# Altium footprint library LimeMicroAltiumLib.PcbLib: 876 footprints (part 52 of 57)
Each footprint in its own frame and in the unit in brackets; x right, y up, seen from the top. Pads: shape width x height; smd on the part's side, far side on the other; paste and mask are expansions set on the pad; w line width, h text height; cw(c..) or ccw(c..) is an arc to the next point about the centre after c.
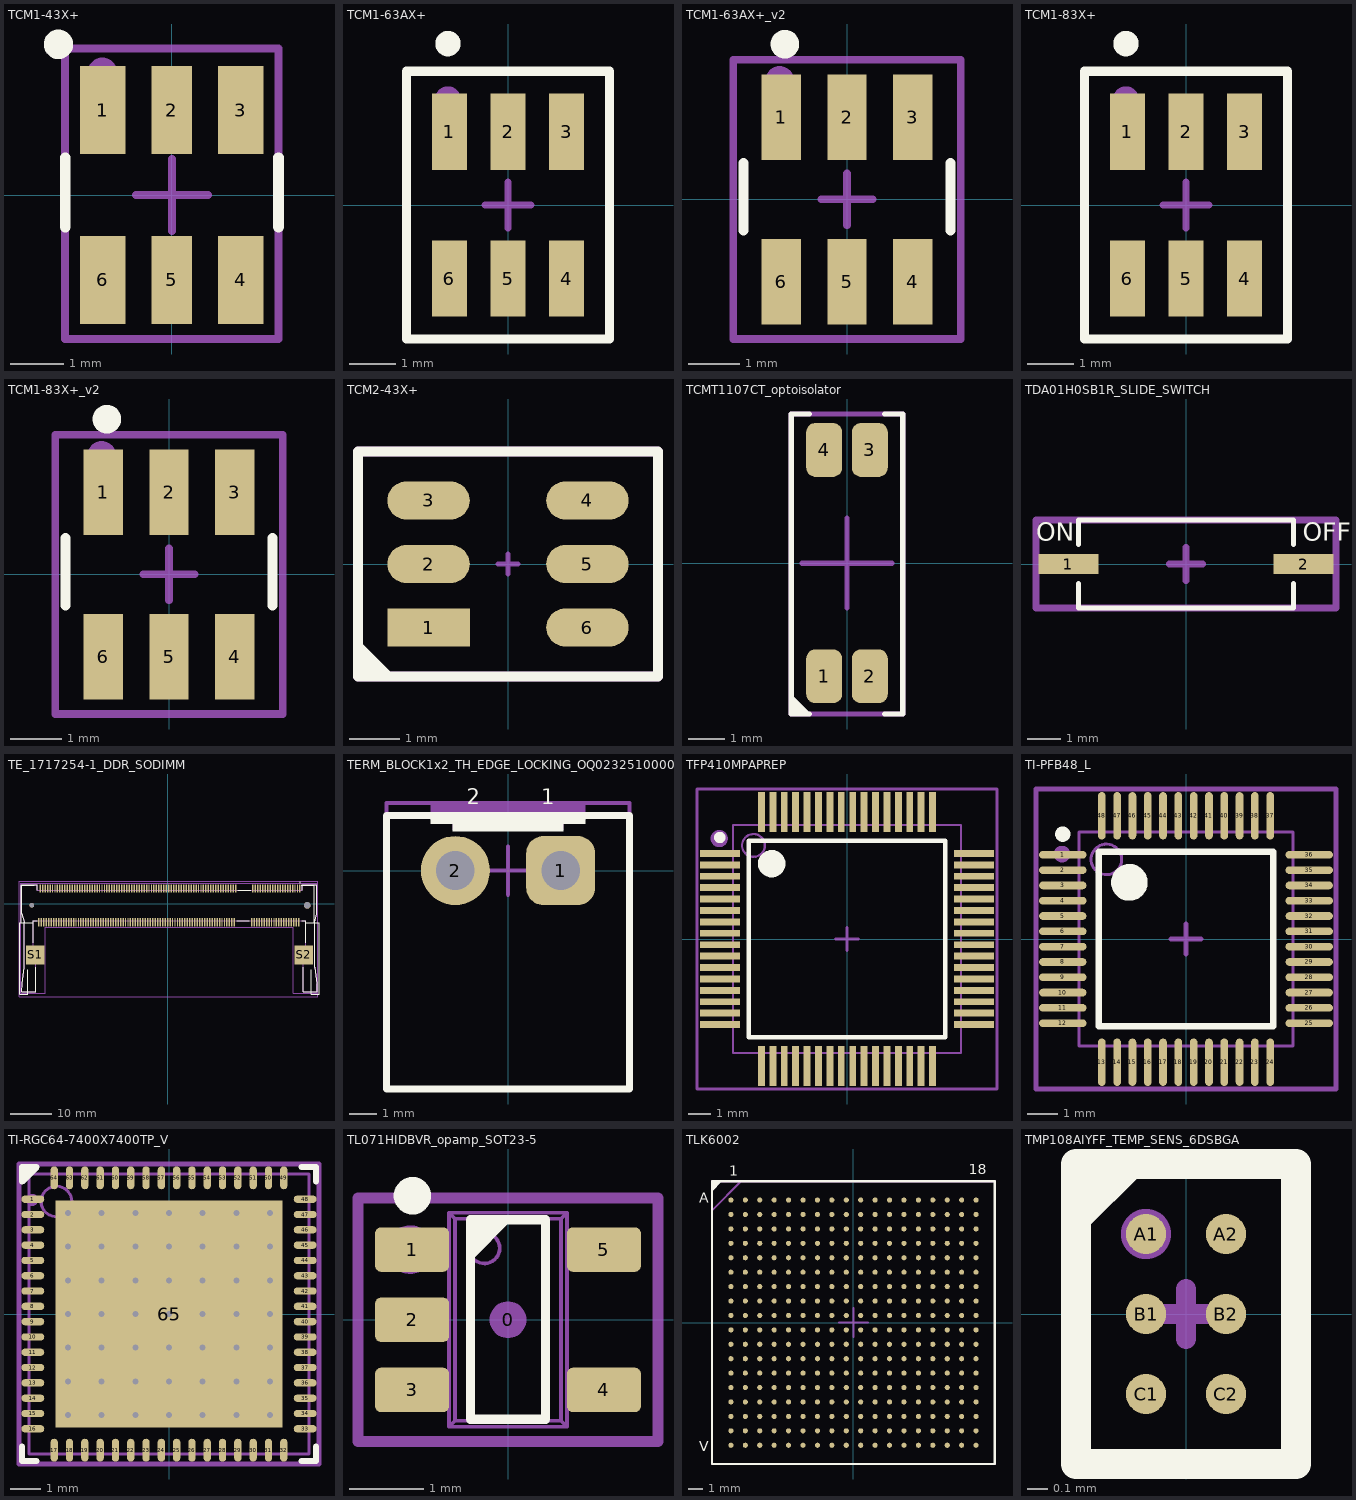
[diagram p51: the footprints below, top view; thin cyan lines are the x and y axes]

## TCM1-43X+ [mm] "Balun"
pads (6):
  rect 0.85x1.65 smd: 1(-1.295,1.59) 3(1.295,1.59) 4(1.295,-1.59) 6(-1.295,-1.59)
  rect 0.76x1.65 smd: 2(0,1.59) 5(0,-1.59)
Top Overlay:
  circle w0.35: c-2.125,2.825 r0.1
  lines w0.2: -2,-0.6 -2,0.7 ; 2,-0.6 2,0.7
Mechanical 15:
  circle w0.35: c-1.3,2.3 r0.1
  lines w0.15: -0.675,0 0,0 ; 0,-0.675 0,0 ; 0,0.675 0,0 ; 0.675,0 0,0 ; -2,-2.7 -2,2.75 2,2.75 2,-2.7 -2,-2.7
  text ".designator" at 0,0 h0.55
3D body: height 1, standoff 0, extent -1.275,-1.612 1.275,1.613
3D body "User Library-LQW2BH.step": height 2.8, standoff 1, extent -0.75,-1 0.75,1

## TCM1-63AX+ [mm] "Balun"
pads (6):
  rect 0.76x1.65 smd: 1(-1.27,1.59) 2(0,1.59) 3(1.27,1.59) 4(1.27,-1.59) 5(0,-1.59) 6(-1.27,-1.59)
Top Overlay:
  circle w0.35: c-1.3,3.5 r0.1
  lines w0.2: -2.2,-2.9 -2.2,2.9 2.2,2.9 2.2,-2.9 -2.2,-2.9
Mechanical 15:
  circle w0.35: c-1.3,2.3 r0.1
  lines w0.15: -0.5,0 0,0 ; 0,-0.5 0,0 ; 0,0.5 0,0 ; 0.5,0 0,0 ; -2.2,-2.9 -2.2,2.9 2.2,2.9 2.2,-2.9 -2.2,-2.9
  text ".designator" at 0,0 h0.55
3D body: height 1, standoff 0, extent -1.275,-1.612 1.275,1.613
3D body "User Library-LQW2BH.step": height 2.8, standoff 1, extent -0.75,-1 0.75,1

## TCM1-63AX+_v2 [mm] "Balun"
pads (6):
  rect 0.76x1.65 smd: 1(-1.27,1.59) 2(0,1.59) 3(1.27,1.59) 4(1.27,-1.59) 5(0,-1.59) 6(-1.27,-1.59)
Top Overlay:
  circle w0.35: c-1.2,3 r0.1
  lines w0.2: -2,-0.6 -2,0.7 ; 2,-0.6 2,0.7
Mechanical 15:
  circle w0.35: c-1.3,2.3 r0.1
  lines w0.15: -0.5,0 0,0 ; 0,-0.5 0,0 ; 0,0.5 0,0 ; 0.5,0 0,0 ; -2.2,-2.7 -2.2,2.7 2.2,2.7 2.2,-2.7 -2.2,-2.7
  text ".designator" at 0,0 h0.55
3D body: height 1, standoff 0, extent -1.275,-1.612 1.275,1.613
3D body "User Library-LQW2BH.step": height 2.8, standoff 1, extent -0.75,-1 0.75,1

## TCM1-83X+ [mm] "Balun"
pads (6):
  rect 0.76x1.65 smd: 1(-1.27,1.59) 2(0,1.59) 3(1.27,1.59) 4(1.27,-1.59) 5(0,-1.59) 6(-1.27,-1.59)
Top Overlay:
  circle w0.35: c-1.3,3.5 r0.1
  lines w0.2: -2.2,-2.9 2.2,-2.9 2.2,2.9 -2.2,2.9 -2.2,-2.9
Mechanical 15:
  circle w0.35: c-1.3,2.3 r0.1
  lines w0.15: -0.5,0 0,0 ; 0,-0.5 0,0 ; 0,0.5 0,0 ; 0.5,0 0,0 ; -2.2,-2.9 2.2,-2.9 2.2,2.9 -2.2,2.9 -2.2,-2.9
  text ".designator" at 0,0 h0.55
3D body "User Library-LQW2BH.step": height 2.8, standoff 1, extent -0.75,-1 0.75,1
3D body: height 1, standoff 0, extent -1.275,-1.612 1.275,1.613

## TCM1-83X+_v2 [mm] "Balun"
pads (6):
  rect 0.76x1.65 smd: 1(-1.27,1.59) 2(0,1.59) 3(1.27,1.59) 4(1.27,-1.59) 5(0,-1.59) 6(-1.27,-1.59)
Top Overlay:
  circle w0.35: c-1.2,3 r0.1
  lines w0.2: -2,-0.6 -2,0.7 ; 2,-0.6 2,0.7
Mechanical 15:
  circle w0.35: c-1.3,2.3 r0.1
  lines w0.15: -0.5,0 0,0 ; 0,-0.5 0,0 ; 0,0.5 0,0 ; 0.5,0 0,0 ; -2.2,-2.7 2.2,-2.7 2.2,2.7 -2.2,2.7 -2.2,-2.7
  text ".designator" at 0,0 h0.55
3D body "User Library-LQW2BH.step": height 2.8, standoff 1, extent -0.75,-1 0.75,1
3D body: height 1, standoff 0, extent -1.275,-1.612 1.275,1.613

## TCM2-43X+ [mm]
pads (6):
  rect 1.65x0.76 smd: 1(-1.59,-1.27)
  oval 1.65x0.76 smd: 2(-1.59,0) 3(-1.59,1.27) 4(1.59,1.27) 5(1.59,0) 6(1.59,-1.27)
Top Overlay:
  region: -3,-1.5 -3,-2.25 -2.25,-2.25
  lines w0.2: -3,-2.25 3,-2.25 3,2.25 -3,2.25 -3,-2.25
Mechanical 15:
  circle w0.2: c-1.75,-1.25 r0.071
  lines w0.1: -0.2,0 0.2,0 ; 0,-0.2 0,0.2
  lines w0.2: -3,-2.25 -3,2.25 3,2.25 3,-2.25 -3,-2.25
  text ".Designator" at 0,0 h0.55
3D body: height 4.06, standoff 0, extent -1.905,-1.905 1.905,2.032

## TCMT1107CT_optoisolator [mm]
pads (4):
  rrect50% 1x1.5 smd mask+0.05: 1(-0.635,-3.15) 2(0.635,-3.15) 3(0.635,3.15) 4(-0.635,3.15)
Top Overlay:
  region: -1,-4.2 -1.55,-3.65 -1.55,-4.2
  lines w0.15: -1.05,-4.2 -1.55,-4.2 -1.55,4.15 -1.05,4.15 ; 1.05,-4.2 1.55,-4.2 1.55,4.15 1.05,4.15
Mechanical 15:
  lines w0.15: -1.55,-4.2 -1.55,4.15 1.55,4.15 1.55,-4.2 -1.5,-4.2 ; -1.25,0 0,0 ; 0,-1.25 0,0 ; 0,1.25 0,0 ; 1.25,0 0,0
  text "4" at -1.1,2.7 h0.55
  text "1" at -0.9,-3.9 h0.55
  text ".Designator" at 0,0 h0.55
3D body "User Library-ACPL-217-56DE.step": height 2.01, standoff -0.12, extent -1.3,-3.55 1.3,3.45

## TDA01H0SB1R_SLIDE_SWITCH [mm]
pads (2):
  rect 1.8x0.6 smd mask+0.05: 1(-3.531,0) 2(3.531,0)
Top Overlay:
  lines w0.152: -3.226,-0.587 -3.226,-1.321 3.226,-1.321 3.226,-0.587 ; -3.226,0.587 -3.226,1.321 3.226,1.321 3.226,0.587
  text "ON" at -4.5,0.7 h0.55
  text "OFF" at 3.5,0.7 h0.55
Mechanical 15:
  lines w0.2: -0.5,0 0,0 ; 0,-0.5 0,0 ; 0,0.5 0,0 ; 0.5,0 0,0 ; -4.5,-1.321 -4.5,1.321 4.5,1.321 4.5,-1.321 -4.5,-1.321
  text ".Designator" at 0,0 h0.55
  text "ON" at -3.9,-0.3 h0.55
3D body "TDA01H0SB1R.stp": height 2.3, standoff 0, extent -4.06,-1.2 4.06,1.2

## TE_1717254-1_DDR_SODIMM [mm] "(DDR2 SO-DIMM)"
pads (204):
  rect 0.35x2 smd mask+0.05: 1(32.025,3.75) 2(31.725,-4.45) 3(31.425,3.75) 4(31.125,-4.45) 5(30.825,3.75) 6(30.525,-4.45) 7(30.225,3.75) 8(29.925,-4.45) 9(29.625,3.75) 10(29.325,-4.45) 11(29.025,3.75) 12(28.725,-4.45) 13(28.425,3.75) 14(28.125,-4.45) 15(27.825,3.75) 16(27.525,-4.45) 17(27.225,3.75) 18(26.925,-4.45) 19(26.625,3.75) 20(26.325,-4.45) 21(26.025,3.75) 22(25.725,-4.45) 23(25.425,3.75) 24(25.125,-4.45) 25(24.825,3.75) 26(24.525,-4.45) 27(24.225,3.75) 28(23.925,-4.45) 29(23.625,3.75) 30(23.325,-4.45) 31(23.025,3.75) 32(22.725,-4.45) 33(22.425,3.75) 34(22.125,-4.45) 35(21.825,3.75) 36(21.525,-4.45) 37(21.225,3.75) 38(20.925,-4.45) 39(20.625,3.75) 40(20.325,-4.45) 41(16.425,3.75) 42(16.125,-4.45) 43(15.825,3.75) 44(15.525,-4.45) 45(15.225,3.75) 46(14.925,-4.45) 47(14.625,3.75) 48(14.325,-4.45) 49(14.025,3.75) 50(13.725,-4.45) 51(13.425,3.75) 52(13.125,-4.45) 53(12.825,3.75) 54(12.525,-4.45) 55(12.225,3.75) 56(11.925,-4.45) 57(11.625,3.75) 58(11.325,-4.45) 59(11.025,3.75) 60(10.725,-4.45) 61(10.425,3.75) 62(10.125,-4.45) 63(9.825,3.75) 64(9.525,-4.45) 65(9.225,3.75) 66(8.925,-4.45) 67(8.625,3.75) 68(8.325,-4.45) 69(8.025,3.75) 70(7.725,-4.45) 71(7.425,3.75) 72(7.125,-4.45) 73(6.825,3.75) 74(6.525,-4.45) 75(6.225,3.75) 76(5.925,-4.45) 77(5.625,3.75) 78(5.325,-4.45) 79(5.025,3.75) 80(4.725,-4.45) 81(4.425,3.75) 82(4.125,-4.45) 83(3.825,3.75) 84(3.525,-4.45) 85(3.225,3.75) 86(2.925,-4.45) 87(2.625,3.75) 88(2.325,-4.45) 89(2.025,3.75) 90(1.725,-4.45) 91(1.425,3.75) 92(1.125,-4.45) 93(0.825,3.75) 94(0.525,-4.45) 95(0.225,3.75) 96(-0.075,-4.45) 97(-0.375,3.75) 98(-0.675,-4.45) 99(-0.975,3.75) 100(-1.275,-4.45) 101(-1.575,3.75) 102(-1.875,-4.45) 103(-2.175,3.75) 104(-2.475,-4.45) 105(-2.775,3.75) 106(-3.075,-4.45) 107(-3.375,3.75) 108(-3.675,-4.45) 109(-3.975,3.75) 110(-4.275,-4.45) 111(-4.575,3.75) 112(-4.875,-4.45) 113(-5.175,3.75) 114(-5.475,-4.45) 115(-5.775,3.75) 116(-6.075,-4.45) 117(-6.375,3.75) 118(-6.675,-4.45) 119(-6.975,3.75) 120(-7.275,-4.45) 121(-7.575,3.75) 122(-7.875,-4.45) 123(-8.175,3.75) 124(-8.475,-4.45) 125(-8.775,3.75) 126(-9.075,-4.45) 127(-9.375,3.75) 128(-9.675,-4.45) 129(-9.975,3.75) 130(-10.275,-4.45) 131(-10.575,3.75) 132(-10.875,-4.45) 133(-11.175,3.75) 134(-11.475,-4.45) 135(-11.775,3.75) 136(-12.075,-4.45) 137(-12.375,3.75) 138(-12.675,-4.45) 139(-12.975,3.75) 140(-13.275,-4.45) 141(-13.575,3.75) 142(-13.875,-4.45) 143(-14.175,3.75) 144(-14.475,-4.45) 145(-14.775,3.75) 146(-15.075,-4.45) 147(-15.375,3.75) 148(-15.675,-4.45) 149(-15.975,3.75) 150(-16.275,-4.45) 151(-16.575,3.75) 152(-16.875,-4.45) 153(-17.175,3.75) 154(-17.475,-4.45) 155(-17.775,3.75) 156(-18.075,-4.45) 157(-18.375,3.75) 158(-18.675,-4.45) 159(-18.975,3.75) 160(-19.275,-4.45) 161(-19.575,3.75) 162(-19.875,-4.45) 163(-20.175,3.75) 164(-20.475,-4.45) 165(-20.775,3.75) 166(-21.075,-4.45) 167(-21.375,3.75) 168(-21.675,-4.45) 169(-21.975,3.75) 170(-22.275,-4.45) 171(-22.575,3.75) 172(-22.875,-4.45) 173(-23.175,3.75) 174(-23.475,-4.45) 175(-23.775,3.75) 176(-24.075,-4.45) 177(-24.375,3.75) 178(-24.675,-4.45) 179(-24.975,3.75) 180(-25.275,-4.45) 181(-25.575,3.75) 182(-25.875,-4.45) 183(-26.175,3.75) 184(-26.475,-4.45) 185(-26.775,3.75) 186(-27.075,-4.45) 187(-27.375,3.75) 188(-27.675,-4.45) 189(-27.975,3.75) 190(-28.275,-4.45) 191(-28.575,3.75) 192(-28.875,-4.45) 193(-29.175,3.75) 194(-29.475,-4.45) 195(-29.775,3.75) 196(-30.075,-4.45) 197(-30.375,3.75) 198(-30.675,-4.45) 199(-30.975,3.75) 200(-31.275,-4.45)
  round 1.1 hole 1.1 unplated: None(-33.025,-0.35)
  round 1.6 hole 1.6 unplated: None(33.775,-0.35)
  rect 4.5x4.6 smd: S1(-32.175,-12.35) S2(32.925,-12.35)
Top Overlay:
  circle w0.15: c32.025,5.2 r0.1
  lines w0.15: -35.512,-4.505 -35.891,-4.505 -35.891,-21.923 -34.031,-21.923 -34.031,-15.999 ; -35.375,-21.35 -32.025,-21.35 -32.025,-15.35 ; -35.375,-21.3 -35.325,-19.35 -34.825,-15.35 -34.825,-4.4 -35.375,-2.35 -35.375,4.65 -31.625,4.65 -31.625,3.35 ; -32.625,-9.35 -32.625,-4.05 -31.725,-4.05 ; -32.625,-4.505 -35.5,-4.505 -35.5,4.5 -32.385,4.5 ; 16.675,-4.05 19.675,-4.05 ; 16.975,3.35 20.075,3.35 ; 32.385,4.499 35.5,4.499 35.5,-4.505 ; 32.475,-4.05 33.375,-4.05 33.375,-9.35 ; 32.575,3.35 32.575,4.65 36.125,4.65 36.125,-2.35 35.575,-4.4 35.575,-15.35 36.075,-19.35 36.125,-21.3 ; 32.775,-15.35 32.775,-21.35 36.125,-21.35 ; 33.375,-4.505 36.25,-4.505 ; 34.781,-15.999 34.781,-21.923 36.641,-21.923 36.641,-4.505 36.262,-4.505
Mechanical 13:
  lines w0.05: -35.625,-21.6 -29.675,-21.6 -29.675,-5.7 30.425,-5.7 30.425,-21.6 36.375,-21.6 36.375,5 -35.625,5 -35.625,-21.6
  lines w0.127: -35.375,-21.35 -32.025,-21.35 -32.025,-14.05 -31.275,-14.05 -31.275,-10.45 -32.625,-10.45 -32.625,-4.05 33.375,-4.05 33.375,-10.45 32.025,-10.45 32.025,-14.05 32.775,-14.05 32.775,-21.35 36.065,-21.35 ; -35.375,-21.3 -35.325,-19.35 -34.825,-15.35 -34.825,-4.4 -35.375,-2.35 -35.375,4.65 -31.625,4.65 -31.625,3.35 32.575,3.35 32.575,4.65 36.125,4.65 36.125,-2.35 35.575,-4.4 35.575,-15.35 36.075,-19.35 36.075,-21.34
Mechanical 15:
  lines w0.3: -36.1,-22.5 36.3,-22.5 36.3,5.5 -36.1,5.5 -36.1,-22.5
  text "199" at -33,3.5 h0.55
  text "200" at -33,-4.5 h0.55
  text "42" at 16,-4.5 h0.55
  text "41" at 16,3.5 h0.55
  text "39" at 19.5,3.5 h0.55
  text "40" at 19,-4.5 h0.55
  text "2" at 31.5,-4.5 h0.55
  text "1" at 31.5,4 h0.55
  text ".Designator" at 0,0 h0.55
3D body "c-1473005-4-j1-3d.stp": height 5.27, standoff -0.63, extent -35.375,-21.425 36.125,4.625
3D body "User Library-compute_module.step": height 4.1, standoff 2.6, extent -33.55,-30.5 34.05,-0.5

## TERM_BLOCK1x2_TH_EDGE_LOCKING_OQ0232510000G [mm]
pads (2):
  rrect50% 2.5x2.5 hole 1.4: 1(1.905,0)
  round 2.5 hole 1.4: 2(-1.905,0)
Top Overlay:
  region: 2,1.425 2,1.775 -2,1.775 -2,1.425
  region: -2.8,2.05 -2.8,1.7 2.8,1.7 2.8,2.05
  lines w0.254: -4.4,-7.9 4.4,-7.9 4.4,2 -4.4,2 -4.4,-7.9
  text "1" at 1.2,2.4 h0.55
  text "2" at -1.5,2.4 h0.55
Mechanical 15:
  region: -2,1.5 -2,1.85 2,1.85 2,1.5
  region: -2.8,2.45 -2.8,1.85 2.8,1.85 2.8,2.45
  lines w0.15: -0.875,0 0,0 ; 0,-0.875 0,0 ; 0,0.875 0,0 ; 0.875,0 0,0 ; -4.4,-7.9 -4.4,2.45 4.4,2.45 4.4,-7.9 -4.4,-7.9
  text ".Designator" at 0,0 h0.55
  text "KEY" at -0.7,0.9 h0.55
  text "1" at 1.125,-1 h0.55
3D body "OQ0232510000G.STEP": height 7.2, standoff -3.5, extent -4.405,-8 4.405,1.2

## TFP410MPAPREP [mm] "TSQFP, 64-Leads, Body 10,00x10,00mm, Pitch 0,50mm, IPC Medium Density"
height 1.2
pads (64):
  rect 1.75x0.3 smd mask+0.05: 1(-5.575,3.75) 2(-5.575,3.25) 3(-5.575,2.75) 4(-5.575,2.25) 5(-5.575,1.75) 6(-5.575,1.25) 7(-5.575,0.75) 8(-5.575,0.25) 9(-5.575,-0.25) 10(-5.575,-0.75) 11(-5.575,-1.25) 12(-5.575,-1.75) 13(-5.575,-2.25) 14(-5.575,-2.75) 15(-5.575,-3.25) 16(-5.575,-3.75) 33(5.575,-3.75) 34(5.575,-3.25) 35(5.575,-2.75) 36(5.575,-2.25) 37(5.575,-1.75) 38(5.575,-1.25) 39(5.575,-0.75) 40(5.575,-0.25) 41(5.575,0.25) 42(5.575,0.75) 43(5.575,1.25) 44(5.575,1.75) 45(5.575,2.25) 46(5.575,2.75) 47(5.575,3.25) 48(5.575,3.75)
  rect 0.3x1.75 smd mask+0.05: 17(-3.75,-5.575) 18(-3.25,-5.575) 19(-2.75,-5.575) 20(-2.25,-5.575) 21(-1.75,-5.575) 22(-1.25,-5.575) 23(-0.75,-5.575) 24(-0.25,-5.575) 25(0.25,-5.575) 26(0.75,-5.575) 27(1.25,-5.575) 28(1.75,-5.575) 29(2.25,-5.575) 30(2.75,-5.575) 31(3.25,-5.575) 32(3.75,-5.575) 49(3.75,5.575) 50(3.25,5.575) 51(2.75,5.575) 52(2.25,5.575) 53(1.75,5.575) 54(1.25,5.575) 55(0.75,5.575) 56(0.25,5.575) 57(-0.25,5.575) 58(-0.75,5.575) 59(-1.25,5.575) 60(-1.75,5.575) 61(-2.25,5.575) 62(-2.75,5.575) 63(-3.25,5.575) 64(-3.75,5.575)
Top Overlay:
  circle w0.25: c-5.575,4.45 r0.125
  circle w0.6: c-3.3,3.3 r0.3
  lines w0.2: -4.3,-4.3 -4.3,4.3 4.3,4.3 4.3,-4.3 -4.3,-4.3
Mechanical 13:
  circle w0.1: c-4.1,4.1 r0.5
  lines w0.1: -5,-5 -5,5 5,5 5,-5 -5,-5
Mechanical 15:
  circle w0.35: c-5.6,4.4 r0.2
  lines w0.15: -0.5,0 0.5,0 ; 0,-0.5 0,0.5 ; -6.575,-6.575 -6.575,6.575 6.575,6.575 6.575,-6.575 -6.575,-6.575
  text ".Designator" at 0,0 h0.55
3D body "User Library-LQFP-64-1.step": height 1.45, standoff -0.05, extent -5,-6 5,6
3D body "User Library-LQFP-64-1.step": height 1.5, standoff 0, extent -6,-5 6,5

## TI-PFB48_L [mm] "QFP, 48-Leads, Body 7x7mm, Pitch 0.5mm, IPC High Density"
height 1.2
pads (48):
  oval 1.55x0.25 smd mask+0.05: 1(-4.025,2.75) 2(-4.025,2.25) 3(-4.025,1.75) 4(-4.025,1.25) 5(-4.025,0.75) 6(-4.025,0.25) 7(-4.025,-0.25) 8(-4.025,-0.75) 9(-4.025,-1.25) 10(-4.025,-1.75) 11(-4.025,-2.25) 12(-4.025,-2.75) 25(4.025,-2.75) 26(4.025,-2.25) 27(4.025,-1.75) 28(4.025,-1.25) 29(4.025,-0.75) 30(4.025,-0.25) 31(4.025,0.25) 32(4.025,0.75) 33(4.025,1.25) 34(4.025,1.75) 35(4.025,2.25) 36(4.025,2.75)
  oval 0.25x1.55 smd mask+0.05: 13(-2.75,-4.025) 14(-2.25,-4.025) 15(-1.75,-4.025) 16(-1.25,-4.025) 17(-0.75,-4.025) 18(-0.25,-4.025) 19(0.25,-4.025) 20(0.75,-4.025) 21(1.25,-4.025) 22(1.75,-4.025) 23(2.25,-4.025) 24(2.75,-4.025) 37(2.75,4.025) 38(2.25,4.025) 39(1.75,4.025) 40(1.25,4.025) 41(0.75,4.025) 42(0.25,4.025) 43(-0.25,4.025) 44(-0.75,4.025) 45(-1.25,4.025) 46(-1.75,4.025) 47(-2.25,4.025) 48(-2.75,4.025)
Top Overlay:
  circle w0.25: c-4.025,3.425 r0.125
  circle w0.6: c-1.85,1.85 r0.3
  lines w0.2: -2.85,-2.85 -2.85,2.85 2.85,2.85 2.85,-2.85 -2.85,-2.85
Mechanical 13:
  circle w0.1: c-2.6,2.6 r0.5
  lines w0.1: -3.5,-3.5 -3.5,3.5 3.5,3.5 3.5,-3.5 -3.5,-3.5
Mechanical 15:
  circle w0.4: c-4.05,2.775 r0.071
  lines w0.15: -0.5,0 0.5,0 ; 0,-0.5 0,0.5 ; -4.9,-4.9 -4.9,4.9 4.9,4.9 4.9,-4.9 -4.9,-4.9
  text ".Designator" at 0,0 h0.55
3D body "User Library-LQFP48_Grid_0_5.STEP": height 1.6, standoff 0, extent -4.5,-4.5 4.5,4.5

## TI-RGC64-7400X7400TP_V [mm] "QFN, 64-Leads, Body 9x9mm, Pitch 0.5mm, Thermal Pad 7.4x7.4mm, TI Recommended"
height 1
pads (65):
  oval 0.75x0.24 smd mask+0.05: 1(-4.45,3.75) 2(-4.45,3.25) 3(-4.45,2.75) 4(-4.45,2.25) 5(-4.45,1.75) 6(-4.45,1.25) 7(-4.45,0.75) 8(-4.45,0.25) 9(-4.45,-0.25) 10(-4.45,-0.75) 11(-4.45,-1.25) 12(-4.45,-1.75) 13(-4.45,-2.25) 14(-4.45,-2.75) 15(-4.45,-3.25) 16(-4.45,-3.75) 33(4.45,-3.75) 34(4.45,-3.25) 35(4.45,-2.75) 36(4.45,-2.25) 37(4.45,-1.75) 38(4.45,-1.25) 39(4.45,-0.75) 40(4.45,-0.25) 41(4.45,0.25) 42(4.45,0.75) 43(4.45,1.25) 44(4.45,1.75) 45(4.45,2.25) 46(4.45,2.75) 47(4.45,3.25) 48(4.45,3.75)
  oval 0.24x0.75 smd mask+0.05: 17(-3.75,-4.45) 18(-3.25,-4.45) 19(-2.75,-4.45) 20(-2.25,-4.45) 21(-1.75,-4.45) 22(-1.25,-4.45) 23(-0.75,-4.45) 24(-0.25,-4.45) 25(0.25,-4.45) 26(0.75,-4.45) 27(1.25,-4.45) 28(1.75,-4.45) 29(2.25,-4.45) 30(2.75,-4.45) 31(3.25,-4.45) 32(3.75,-4.45) 49(3.75,4.45) 50(3.25,4.45) 51(2.75,4.45) 52(2.25,4.45) 53(1.75,4.45) 54(1.25,4.45) 55(0.75,4.45) 56(0.25,4.45) 57(-0.25,4.45) 58(-0.75,4.45) 59(-1.25,4.45) 60(-1.75,4.45) 61(-2.25,4.45) 62(-2.75,4.45) 63(-3.25,4.45) 64(-3.75,4.45)
  rect 7.4x7.4 smd: 65(0,0)
via 3.3,-3.3 diameter 0.5 hole 0.2
via 2.2,-3.3 diameter 0.5 hole 0.2
via 1.1,-3.3 diameter 0.5 hole 0.2
via 0,-3.3 diameter 0.5 hole 0.2
via -1.1,-3.3 diameter 0.5 hole 0.2
via -2.2,-3.3 diameter 0.5 hole 0.2
via -3.3,-3.3 diameter 0.5 hole 0.2
via 3.3,-2.2 diameter 0.5 hole 0.2
via 2.2,-2.2 diameter 0.5 hole 0.2
via 1.1,-2.2 diameter 0.5 hole 0.2
via 0,-2.2 diameter 0.5 hole 0.2
via -1.1,-2.2 diameter 0.5 hole 0.2
via -2.2,-2.2 diameter 0.5 hole 0.2
via -3.3,-2.2 diameter 0.5 hole 0.2
via 3.3,-1.1 diameter 0.5 hole 0.2
via 2.2,-1.1 diameter 0.5 hole 0.2
via 1.1,-1.1 diameter 0.5 hole 0.2
via 0,-1.1 diameter 0.5 hole 0.2
via -1.1,-1.1 diameter 0.5 hole 0.2
via -2.2,-1.1 diameter 0.5 hole 0.2
via -3.3,-1.1 diameter 0.5 hole 0.2
via 3.3,0 diameter 0.5 hole 0.2
via 2.2,0 diameter 0.5 hole 0.2
via 1.1,0 diameter 0.5 hole 0.2
via 0,0 diameter 0.5 hole 0.2
via -1.1,0 diameter 0.5 hole 0.2
via -2.2,0 diameter 0.5 hole 0.2
via -3.3,0 diameter 0.5 hole 0.2
via 3.3,1.1 diameter 0.5 hole 0.2
via 2.2,1.1 diameter 0.5 hole 0.2
via 1.1,1.1 diameter 0.5 hole 0.2
via 0,1.1 diameter 0.5 hole 0.2
via -1.1,1.1 diameter 0.5 hole 0.2
via -2.2,1.1 diameter 0.5 hole 0.2
via -3.3,1.1 diameter 0.5 hole 0.2
via 3.3,2.2 diameter 0.5 hole 0.2
via 2.2,2.2 diameter 0.5 hole 0.2
via 1.1,2.2 diameter 0.5 hole 0.2
via 0,2.2 diameter 0.5 hole 0.2
via -1.1,2.2 diameter 0.5 hole 0.2
via -2.2,2.2 diameter 0.5 hole 0.2
via -3.3,2.2 diameter 0.5 hole 0.2
via 3.3,3.3 diameter 0.5 hole 0.2
via 2.2,3.3 diameter 0.5 hole 0.2
via 1.1,3.3 diameter 0.5 hole 0.2
via 0,3.3 diameter 0.5 hole 0.2
via -1.1,3.3 diameter 0.5 hole 0.2
via -2.2,3.3 diameter 0.5 hole 0.2
via -3.3,3.3 diameter 0.5 hole 0.2
Top Overlay:
  region: -4.8,4.325 -4.8,4.8 -4.325,4.8
  lines w0.2: -4.8,-4.325 -4.8,-4.8 -4.325,-4.8 ; 4.325,-4.8 4.8,-4.8 4.8,-4.325 ; 4.325,4.8 4.8,4.8 4.8,4.325 ; -4.8,4.325 -4.325,4.8 -4.8,4.8 -4.8,4.325
Mechanical 13:
  circle w0.1: c-3.675,3.675 r0.5
  lines w0.1: -4.575,-4.575 4.575,-4.575 4.575,4.575 -4.575,4.575 -4.575,-4.575
Mechanical 15:
  circle w0.254: c-4.475,3.725 r0.071
  lines w0.15: -0.5,0 0.5,0 ; 0,-0.5 0,0.5 ; -4.9,-4.9 4.9,-4.9 4.9,4.9 -4.9,4.9 -4.9,-4.9
  text ".Designator" at 0,0 h0.55
3D body "User Library-QFN64-2.step": height 0.9, standoff 0, extent -4.52,-4.52 4.52,4.52

## TL071HIDBVR_opamp_SOT23-5 [mm]
height 1.6
pads (6):
  round 0.5 on Mech15: 0(0,0)
  rrect25% 1x0.6 smd: 1(-1.3,0.95) 2(-1.3,0) 3(-1.3,-0.95) 4(1.3,-0.95) 5(1.3,0.95)
Top Overlay:
  circle w0.254: c-1.295,1.68 r0.127
  region: -0.508,1.353 0.053,1.353 -0.508,0.792
  lines w0.127: -0.508,-1.347 -0.508,1.353 0.508,1.353 0.508,-1.347 -0.508,-1.347
Mechanical 13:
  circle w0.05: c-0.32,0.97 r0.208
  lines w0.05: -1.191,-1.15 -1.191,-0.75 ; -1.191,-0.2 -1.191,0.2 ; -1.191,0.75 -1.191,1.15 ; -1.1,-1.15 -1.1,-0.75 ; -1.1,-0.2 -1.1,0.2 ; -1.1,0.75 -1.1,1.15 ; -1.094,-1.15 -1.094,-0.75 ; -1.094,-0.2 -1.094,0.2 ; -1.094,0.75 -1.094,1.15 ; -0.844,-1.15 -0.844,-0.75 ; -0.844,-0.2 -0.844,0.2 ; -0.844,0.75 -0.844,1.15 ; -0.8,-1.15 -1.4,-1.15 -1.4,-0.75 -0.8,-0.75 ; -0.8,-0.2 -1.4,-0.2 -1.4,0.2 -0.8,0.2 ; -0.8,0.75 -1.4,0.75 -1.4,1.15 -0.8,1.15 ; 0.8,-1.15 1.4,-1.15 1.4,-0.75 0.8,-0.75 ; 0.8,0.75 1.4,0.75 1.4,1.15 0.8,1.15 ; 0.844,-1.15 0.844,-0.75 ; 0.844,0.75 0.844,1.15 ; 1.094,-1.15 1.094,-0.75 ; 1.094,0.75 1.094,1.15 ; 1.1,-1.15 1.1,-0.75 ; 1.1,0.75 1.1,1.15 ; 1.191,-1.15 1.191,-0.75 ; 1.191,0.75 1.191,1.15 ; -0.8,-1.45 -0.8,1.45 ; -0.8,-1.45 -0.719,-1.369 ; -0.8,-1.45 0.8,-1.45 ; -0.8,1.45 -0.719,1.369 ; -0.8,1.45 0.8,1.45 ; -0.719,-1.369 0.719,-1.369 ; -0.719,-1.369 -0.719,1.369 ; -0.719,1.369 0.719,1.369 ; 0.719,-1.369 0.8,-1.45 ; 0.719,-1.369 0.719,1.369 ; 0.719,1.369 0.8,1.45 ; 0.8,-1.45 0.8,1.45
Mechanical 15:
  circle w0.35: c-1.325,0.95 r0.152
  lines w0.15: -2.032,-1.651 -2.032,1.651 2.032,1.651 2.032,-1.651 -2.032,-1.651
  text ".Designator" at 0,0 h0.55
3D body "SOT23-5.STEP": height 1.44, standoff -0.01, extent -1.4,-1.45 1.4,1.45

## TLK6002 [mm]
pads (324):
  round 0.356 smd: A1(-8.5,8.5) A2(-7.5,8.5) A3(-6.5,8.5) A4(-5.5,8.5) A5(-4.5,8.5) A6(-3.5,8.5) A7(-2.5,8.5) A8(-1.5,8.5) A9(-0.5,8.5) A10(0.5,8.5) A11(1.5,8.5) A12(2.5,8.5) A13(3.5,8.5) A14(4.5,8.5) A15(5.5,8.5) A16(6.5,8.5) A17(7.5,8.5) A18(8.5,8.5) B1(-8.5,7.5) B2(-7.5,7.5) B3(-6.5,7.5) B4(-5.5,7.5) B5(-4.5,7.5) B6(-3.5,7.5) B7(-2.5,7.5) B8(-1.5,7.5) B9(-0.5,7.5) B10(0.5,7.5) B11(1.5,7.5) B12(2.5,7.5) B13(3.5,7.5) B14(4.5,7.5) B15(5.5,7.5) B16(6.5,7.5) B17(7.5,7.5) B18(8.5,7.5) C1(-8.5,6.5) C2(-7.5,6.5) C3(-6.5,6.5) C4(-5.5,6.5) C5(-4.5,6.5) C6(-3.5,6.5) C7(-2.5,6.5) C8(-1.5,6.5) C9(-0.5,6.5) C10(0.5,6.5) C11(1.5,6.5) C12(2.5,6.5) C13(3.5,6.5) C14(4.5,6.5) C15(5.5,6.5) C16(6.5,6.5) C17(7.5,6.5) C18(8.5,6.5) D1(-8.5,5.5) D2(-7.5,5.5) D3(-6.5,5.5) D4(-5.5,5.5) D5(-4.5,5.5) D6(-3.5,5.5) D7(-2.5,5.5) D8(-1.5,5.5) D9(-0.5,5.5) D10(0.5,5.5) D11(1.5,5.5) D12(2.5,5.5) D13(3.5,5.5) D14(4.5,5.5) D15(5.5,5.5) D16(6.5,5.5) D17(7.5,5.5) D18(8.5,5.5) E1(-8.5,4.5) E2(-7.5,4.5) E3(-6.5,4.5) E4(-5.5,4.5) E5(-4.5,4.5) E6(-3.5,4.5) E7(-2.5,4.5) E8(-1.5,4.5) E9(-0.5,4.5) E10(0.5,4.5) E11(1.5,4.5) E12(2.5,4.5) E13(3.5,4.5) E14(4.5,4.5) E15(5.5,4.5) E16(6.5,4.5) E17(7.5,4.5) E18(8.5,4.5) F1(-8.5,3.5) F2(-7.5,3.5) F3(-6.5,3.5) F4(-5.5,3.5) F5(-4.5,3.5) F6(-3.5,3.5) F7(-2.5,3.5) F8(-1.5,3.5) F9(-0.5,3.5) F10(0.5,3.5) F11(1.5,3.5) F12(2.5,3.5) F13(3.5,3.5) F14(4.5,3.5) F15(5.5,3.5) F16(6.5,3.5) F17(7.5,3.5) F18(8.5,3.5) G1(-8.5,2.5) G2(-7.5,2.5) G3(-6.5,2.5) G4(-5.5,2.5) G5(-4.5,2.5) G6(-3.5,2.5) G7(-2.5,2.5) G8(-1.5,2.5) G9(-0.5,2.5) G10(0.5,2.5) G11(1.5,2.5) G12(2.5,2.5) G13(3.5,2.5) G14(4.5,2.5) G15(5.5,2.5) G16(6.5,2.5) G17(7.5,2.5) G18(8.5,2.5) H1(-8.5,1.5) H2(-7.5,1.5) H3(-6.5,1.5) H4(-5.5,1.5) H5(-4.5,1.5) H6(-3.5,1.5) H7(-2.5,1.5) H8(-1.5,1.5) H9(-0.5,1.5) H10(0.5,1.5) H11(1.5,1.5) H12(2.5,1.5) H13(3.5,1.5) H14(4.5,1.5) H15(5.5,1.5) H16(6.5,1.5) H17(7.5,1.5) H18(8.5,1.5) J1(-8.5,0.5) J2(-7.5,0.5) J3(-6.5,0.5) J4(-5.5,0.5) J5(-4.5,0.5) J6(-3.5,0.5) J7(-2.5,0.5) J8(-1.5,0.5) J9(-0.5,0.5) J10(0.5,0.5) J11(1.5,0.5) J12(2.5,0.5) J13(3.5,0.5) J14(4.5,0.5) J15(5.5,0.5) J16(6.5,0.5) J17(7.5,0.5) J18(8.5,0.5) K1(-8.5,-0.5) K2(-7.5,-0.5) K3(-6.5,-0.5) K4(-5.5,-0.5) K5(-4.5,-0.5) K6(-3.5,-0.5) K7(-2.5,-0.5) K8(-1.5,-0.5) K9(-0.5,-0.5) K10(0.5,-0.5) K11(1.5,-0.5) K12(2.5,-0.5) K13(3.5,-0.5) K14(4.5,-0.5) K15(5.5,-0.5) K16(6.5,-0.5) K17(7.5,-0.5) K18(8.5,-0.5) L1(-8.5,-1.5) L2(-7.5,-1.5) L3(-6.5,-1.5) L4(-5.5,-1.5) L5(-4.5,-1.5) L6(-3.5,-1.5) L7(-2.5,-1.5) L8(-1.5,-1.5) L9(-0.5,-1.5) L10(0.5,-1.5) L11(1.5,-1.5) L12(2.5,-1.5) L13(3.5,-1.5) L14(4.5,-1.5) L15(5.5,-1.5) L16(6.5,-1.5) L17(7.5,-1.5) L18(8.5,-1.5) M1(-8.5,-2.5) M2(-7.5,-2.5) M3(-6.5,-2.5) M4(-5.5,-2.5) M5(-4.5,-2.5) M6(-3.5,-2.5) M7(-2.5,-2.5) M8(-1.5,-2.5) M9(-0.5,-2.5) M10(0.5,-2.5) M11(1.5,-2.5) M12(2.5,-2.5) M13(3.5,-2.5) M14(4.5,-2.5) M15(5.5,-2.5) M16(6.5,-2.5) M17(7.5,-2.5) M18(8.5,-2.5) N1(-8.5,-3.5) N2(-7.5,-3.5) N3(-6.5,-3.5) N4(-5.5,-3.5) N5(-4.5,-3.5) N6(-3.5,-3.5) N7(-2.5,-3.5) N8(-1.5,-3.5) N9(-0.5,-3.5) N10(0.5,-3.5) N11(1.5,-3.5) N12(2.5,-3.5) N13(3.5,-3.5) N14(4.5,-3.5) N15(5.5,-3.5) N16(6.5,-3.5) N17(7.5,-3.5) N18(8.5,-3.5) P1(-8.5,-4.5) P2(-7.5,-4.5) P3(-6.5,-4.5) P4(-5.5,-4.5) P5(-4.5,-4.5) P6(-3.5,-4.5) P7(-2.5,-4.5) P8(-1.5,-4.5) P9(-0.5,-4.5) P10(0.5,-4.5) P11(1.5,-4.5) P12(2.5,-4.5) P13(3.5,-4.5) P14(4.5,-4.5) P15(5.5,-4.5) P16(6.5,-4.5) P17(7.5,-4.5) P18(8.5,-4.5) R1(-8.5,-5.5) R2(-7.5,-5.5) R3(-6.5,-5.5) R4(-5.5,-5.5) R5(-4.5,-5.5) R6(-3.5,-5.5) R7(-2.5,-5.5) R8(-1.5,-5.5) R9(-0.5,-5.5) R10(0.5,-5.5) R11(1.5,-5.5) R12(2.5,-5.5) R13(3.5,-5.5) R14(4.5,-5.5) R15(5.5,-5.5) R16(6.5,-5.5) R17(7.5,-5.5) R18(8.5,-5.5) T1(-8.5,-6.5) T2(-7.5,-6.5) T3(-6.5,-6.5) T4(-5.5,-6.5) T5(-4.5,-6.5) T6(-3.5,-6.5) T7(-2.5,-6.5) T8(-1.5,-6.5) T9(-0.5,-6.5) T10(0.5,-6.5) T11(1.5,-6.5) T12(2.5,-6.5) T13(3.5,-6.5) T14(4.5,-6.5) T15(5.5,-6.5) T16(6.5,-6.5) T17(7.5,-6.5) T18(8.5,-6.5) U1(-8.5,-7.5) U2(-7.5,-7.5) U3(-6.5,-7.5) U4(-5.5,-7.5) U5(-4.5,-7.5) U6(-3.5,-7.5) U7(-2.5,-7.5) U8(-1.5,-7.5) U9(-0.5,-7.5) U10(0.5,-7.5) U11(1.5,-7.5) U12(2.5,-7.5) U13(3.5,-7.5) U14(4.5,-7.5) U15(5.5,-7.5) U16(6.5,-7.5) U17(7.5,-7.5) U18(8.5,-7.5) V1(-8.5,-8.5) V2(-7.5,-8.5) V3(-6.5,-8.5) V4(-5.5,-8.5) V5(-4.5,-8.5) V6(-3.5,-8.5) V7(-2.5,-8.5) V8(-1.5,-8.5) V9(-0.5,-8.5) V10(0.5,-8.5) V11(1.5,-8.5) V12(2.5,-8.5) V13(3.5,-8.5) V14(4.5,-8.5) V15(5.5,-8.5) V16(6.5,-8.5) V17(7.5,-8.5) V18(8.5,-8.5)
Top Overlay:
  region: -9.8,9.2 -9.8,9.8 -9.2,9.8
  lines w0.152: -9.8,9.2 -9.2,9.8 ; -9.8,-9.8 9.8,-9.8 9.8,9.8 -9.8,9.8 -9.8,-9.8
  text "18" at 8,10.3 h0.7
  text "1" at -8.6,10.2 h0.7
  text "V" at -10.7,-8.9 h0.7
  text "A" at -10.7,8.3 h0.7
Mechanical 15:
  lines w0.15: -9.8,7.8 -7.8,9.8 ; -1,0 1,0 ; 0,-1 0,1 ; -9.8,-9.8 9.8,-9.8 9.8,9.8 -9.8,9.8 -9.8,-9.8
  text ".Designator" at -0.1,0 h0.55
  text "A" at -10.7,8.3 h0.7
  text "V" at -10.7,-8.9 h0.7
  text "1" at -8.6,10.2 h0.7
  text "18" at 8,10.3 h0.7
3D body: height 1.2, standoff 0, extent -9.6,-9.6 9.6,9.6
3D body: height 1.27, standoff 0, extent -8.798,8.201 -8.2,8.8

## TMP108AIYFF_TEMP_SENS_6DSBGA [mm]
pads (6):
  round 0.2 smd paste+0 mask+0.05: A1(-0.2,0.4) A2(0.2,0.4) B1(-0.2,0) B2(0.2,0) C1(-0.2,-0.4) C2(0.2,-0.4)
Top Overlay:
  region: -0.55,0.75 -0.55,0.375 -0.175,0.75
  lines w0.15: -0.55,-0.75 0.55,-0.75 0.55,0.75 -0.55,0.75 -0.55,-0.75
Mechanical 15:
  circle w0.2: c-0.2,0.4 r0.025
  lines w0.1: -0.125,0 0,0 ; 0,-0.125 0,0 ; 0,0.125 0,0 ; 0.125,0 0,0 ; -0.55,-0.75 -0.55,0.75 0.55,0.75 0.55,-0.75 -0.55,-0.75
  text ".Designator" at 0.063,0 h0.55
3D body: height 0.67, standoff 0.66, extent -0.299,0.3 -0.1,0.5
3D body: height 0.66, standoff 0.16, extent -0.4,-0.6 0.4,0.6
3D body: height 0.23, standoff -0.03, extent -0.317,-0.523 -0.075,-0.277
3D body: height 0.23, standoff -0.03, extent -0.317,0.277 -0.075,0.523
3D body: height 0.23, standoff -0.03, extent 0.083,-0.523 0.325,-0.277
3D body: height 0.23, standoff -0.03, extent 0.083,0.277 0.325,0.523
3D body: height 0.23, standoff -0.03, extent -0.317,-0.123 -0.075,0.123
3D body: height 0.23, standoff -0.03, extent 0.083,-0.123 0.325,0.123